# Altium footprint library StandardCase.PcbLib: 209 footprints (part 2 of 14)
Each footprint in its own frame and in the unit in brackets; x right, y up, seen from the top. Pads: shape width x height; smd on the part's side, far side on the other; paste and mask are expansions set on the pad; w line width, h text height; cw(c..) or ccw(c..) is an arc to the next point about the centre after c.
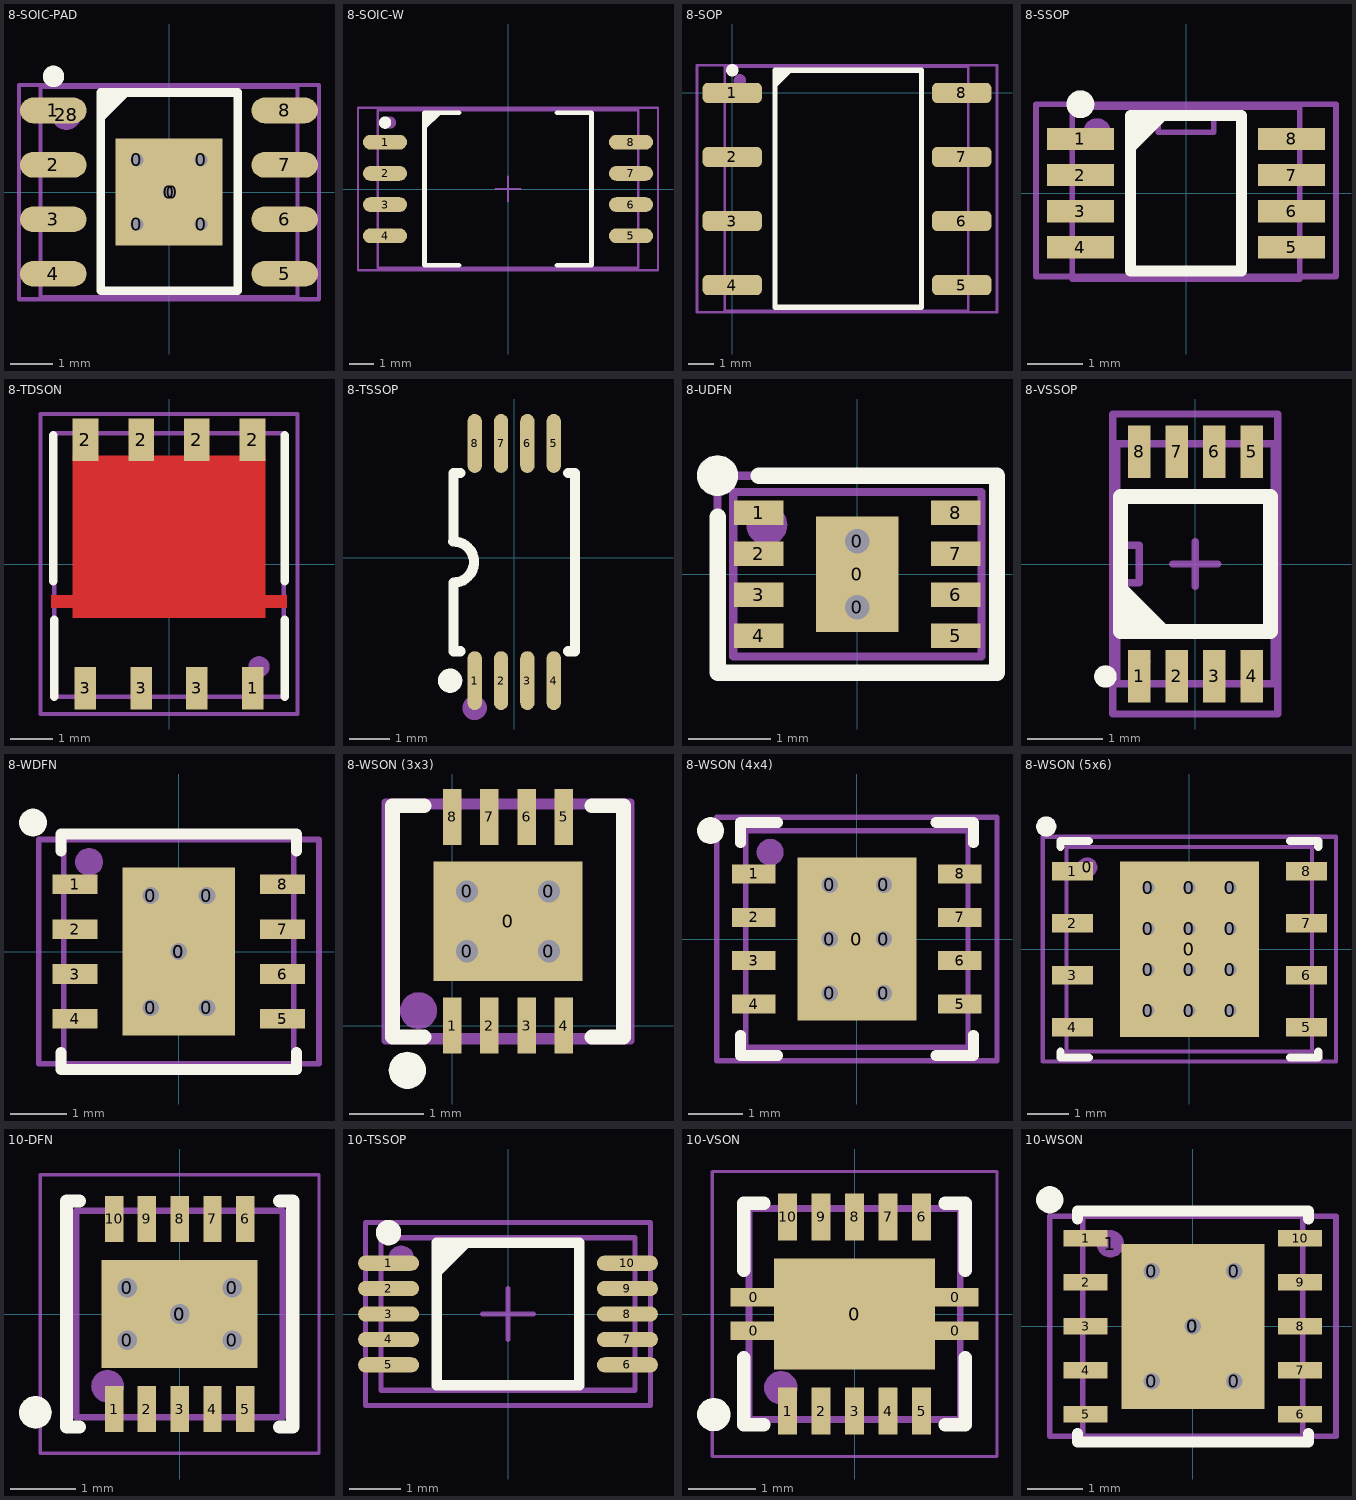
[diagram p1: the footprints below, top view; thin cyan lines are the x and y axes]

## 8-SOIC-PAD [mm] "pitch 1.27 mm, power pad"
pads (15):
  round 0.7 hole 0.3: 0(-0.75,-0.75) 0(-0.75,0.75) 0(0,0) 0(0.75,-0.75) 0(0.75,0.75)
  rrect100% 1.55x0.6 smd: 1(-2.7,1.905) 2(-2.7,0.635) 3(-2.7,-0.635) 4(-2.7,-1.905) 5(2.7,-1.905) 6(2.7,-0.635) 7(2.7,0.635) 8(2.7,1.905)
  round 0.7 on Mech1: 28(-2.395,1.8)
  rect 2.5x2.5 smd: " 0"(0,0)
Top Overlay:
  circle w0.25: c-2.695,2.7 r0.125
  region: -1.595,2.325 -1.595,1.605 -0.875,2.325
  lines w0.2: -1.595,-2.3 -1.595,2.325 1.605,2.325 1.605,-2.3 -1.595,-2.3
Mechanical 1:
  lines w0.1: -3,-2.45 3,-2.45 3,2.45 -3,2.45 -3,-2.45
Mechanical 15:
  lines w0.1: -0.25,0 0.25,0 ; 0,-0.25 0,0.25 ; -3.5,-2.5 3.5,-2.5 3.5,2.5 -3.5,2.5 -3.5,-2.5
3D body "User Library-SOIC-8-1.STEP": height 1.75, standoff 0, extent -3,-2.45 3,2.45

## 8-SOIC-W [mm] "pitch 1.27 mm, isolator"
pads (9):
  oval 1.8x0.6 smd: 1(-5,1.905) 2(-5,0.635) 3(-5,-0.635) 4(-5,-1.905) 5(5,-1.905) 6(5,-0.635) 7(5,0.635) 8(5,1.905)
  round 0.5 on Mech1: ""(-4.8,2.7)
Top Overlay:
  circle w0.25: c-5,2.7 r0.125
  region: -3.4,3.1 -3.4,2.38 -2.68,3.1
  lines w0.2: -2,-3.1 -3.4,-3.1 -3.4,3.1 -2,3.1 ; 2,-3.1 3.4,-3.1 3.4,3.1 2,3.1
Mechanical 1:
  lines w0.1: -5.3,-3.2 -5.3,3.2 5.3,3.2 5.3,-3.2 -5.3,-3.2
Mechanical 15:
  lines w0.1: -0.5,0 0.5,0 ; 0,-0.5 0,0.5 ; -6.1,-3.3 6.1,-3.3 6.1,3.3 -6.1,3.3 -6.1,-3.3
3D body "1EDC60I12AHXUMA1.STEP": height 1.7, standoff 0, extent -5.321,-3.18 5.321,3.17

## 8-SOP [mm] "pitch 2.54 mm"
pads (10):
  rrect50% 2.35x0.8 smd: 1(0,0) 2(0,-2.54) 3(0,-5.08) 4(0,-7.62) 5(9.1,-7.62) 6(9.1,-5.08) 7(9.1,-2.54) 8(9.1,0)
  round 0.5 on Top Overlay: ""(0,0.9)
  round 0.5 on Mech1: ""(0.3,0.5)
Top Overlay:
  region: 1.7,0.9 1.7,0.18 2.42,0.9
  lines w0.2: 1.7,-8.5 1.7,0.9 7.5,0.9 7.5,-8.5 1.7,-8.5
Mechanical 1:
  lines w0.1: -0.3,-8.63 -0.3,1.03 9.36,1.03 9.36,-8.63 -0.3,-8.63
Mechanical 15:
  lines w0.1: -1.4,-8.7 -1.4,1.1 10.5,1.1 10.5,-8.7 -1.4,-8.7
3D body "3120.STEP": height 4.79, standoff 0, extent -0.3,-8.63 9.36,1.03

## 8-SSOP [mm] "3x3 mm, pitch 0.65 mm"
height 1.1
pads (9):
  rect 1.2x0.4 smd: 1(-1.9,0.975) 2(-1.9,0.325) 3(-1.9,-0.325) 4(-1.9,-0.975) 5(1.9,-0.975) 6(1.9,-0.325) 7(1.9,0.325) 8(1.9,0.975)
  round 0.5 on Mech1: ""(-1.6,1.1)
Top Overlay:
  circle w0.25: c-1.9,1.6 r0.125
  region: -1,1.4 -1,0.68 -0.28,1.4
  lines w0.2: -1,-1.4 1,-1.4 1,1.4 -1,1.4 -1,-1.4
Mechanical 1:
  lines w0.1: -0.5,1.55 -0.5,1.1 0.5,1.1 0.5,1.55 ; -2.05,-1.55 2.05,-1.55 2.05,1.55 -2.05,1.55 -2.05,-1.55
Mechanical 15:
  lines w0.1: -2.7,-1.5 2.7,-1.5 2.7,1.6 -2.7,1.6 -2.7,-1.5
3D body "SW3dPS-TSSOP8-1.STEP": height 1.1, standoff 0, extent -2.05,-1.55 2.05,1.55

## 8-TDSON [mm] "pitch 1.3 mm, power pad"
height 1
pads (9):
  rect 0.5x1 smd: 1(1.95,-2.9) 3(-1.95,-2.9) 3(-0.65,-2.9) 3(0.65,-2.9)
  rect 0.6x1 smd: 2(-1.95,2.9) 2(-0.65,2.9) 2(0.65,2.9) 2(1.95,2.9)
  round 0.5 on Mech1: ""(2.1,-2.4)
Top Layer:
  region: -2.75,-1.025 -2.25,-1.025 -2.25,-1.25 2.25,-1.25 2.25,-1.025 2.75,-1.025 2.75,-0.725 -2.75,-0.725
  region: -2.25,2.525 -1.65,2.525 -0.95,2.525 -0.35,2.525 0.35,2.525 0.95,2.525 1.65,2.525 2.25,2.525 2.25,-0.725 2.75,-0.725 2.75,-1.025 -2.75,-1.025 -2.75,-0.725 -2.25,-0.725
Top Overlay:
  lines w0.2: -2.7,-0.4 -2.7,3 ; -2.675,-3.1 -2.675,-1.3 ; 2.7,-3.1 2.7,-1.3 ; 2.7,-0.4 2.7,3
Top Paste:
  rectangle: -2.25,-1.25 2.25,2.525
  rectangle: 2.25,-1.025 2.75,-0.725
  rectangle: -2.75,-1.025 -2.25,-0.725
Top Solder:
  region: -2.35,2.625 -2.35,-0.625 -2.85,-0.625 -2.85,-1.125 -2.35,-1.125 -2.35,-1.35 2.35,-1.35 2.35,-1.125 2.85,-1.125 2.85,-0.625 2.35,-0.625 2.35,2.625
Mechanical 1:
  lines w0.1: -2.675,-3.1 2.675,-3.1 2.675,3.05 -2.675,3.05 -2.675,-3.1
Mechanical 15:
  lines w0.1: -0.2,0 0.2,0 ; 0,-0.2 0,0.2 ; -3,-3.5 2.9,-3.5 3,-3.5 3,3.5 -3,3.5 -3,-3.5
3D body "User Library-TDSON-8-1.STEP": height 1.03, standoff 0.03, extent -2.675,-3.1 2.675,3.05

## 8-TSSOP [mm]
pads (8):
  oval 0.353x1.454 smd paste+0 mask+0.051: 1(-0.971,-3.035) 2(-0.321,-3.035) 3(0.329,-3.035) 4(0.979,-3.035) 5(0.979,2.819) 6(0.329,2.819) 7(-0.321,2.819) 8(-0.971,2.819)
Top Overlay:
  circle w0.3: c-1.578,-3.035 r0.15
  lines w0.254: -1.498,0.4 cw(c-1.497,-0.108) -1.496,-0.616 -1.496,-2.308 -1.324,-2.308 ; -1.496,0.4 -1.496,2.092 -1.324,2.092 ; 1.331,-2.308 1.504,-2.308 1.504,2.092 1.331,2.092
Mechanical 15:
  circle w0.3: c-0.972,-3.708 r0.15

## 8-UDFN [mm] "3x2 mm, pitch 0.5 mm, power pad"
height 0.75
pads (13):
  round 0.6 hole 0.3: 0(0,-0.4) 0(0,0.4)
  rect 1x1.4 smd: 0(0,0)
  rect 0.6x0.3 smd mask+0.05: 1(-1.2,0.75) 2(-1.2,0.25) 3(-1.2,-0.25) 4(-1.2,-0.75) 5(1.2,-0.75) 6(1.2,-0.25) 7(1.2,0.25) 8(1.2,0.75)
  round 0.5 on Top Overlay: ""(-1.7,1.2)
  round 0.5 on Mech1: ""(-1.1,0.6)
Top Overlay:
  lines w0.2: -1.7,0.7 -1.7,-1.2 1.7,-1.2 1.7,1.2 -1.2,1.2
Mechanical 1:
  lines w0.1: -1.51,-1 1.51,-1 1.51,1 -1.51,1 -1.51,-1
Mechanical 15:
  lines w0.1: -0.2,0 0.2,0 ; 0,-0.2 0,0.2 ; -1.7,-1.2 -1.7,1.2 1.7,1.2 1.7,-1.2 -1.7,-1.2
3D body "8UDFN.STEP": height 0.6, standoff 0, extent -1.51,-1 1.51,1

## 8-VSSOP [mm]
pads (10):
  rect 0.3x0.7 smd: 1(-0.75,-1.5) 2(-0.25,-1.5) 3(0.25,-1.5) 4(0.75,-1.5) 5(0.75,1.5) 6(0.25,1.5) 7(-0.25,1.5) 8(-0.75,1.5)
  round 0.3 on Top Overlay: ""(-1.2,-1.5)
  round 0.3 on Mech1: ""(-0.75,-1.3)
Top Overlay:
  region: -1,-0.9 -1,-0.2 -0.3,-0.9
  lines w0.2: -1,-0.9 1,-0.9 1,0.9 -1,0.9 -1,-0.9
Mechanical 1:
  lines w0.1: -1.05,-0.25 -0.75,-0.25 -0.75,0.25 -1.05,0.25 ; -1.05,-1.6 -1.05,1.6 1.05,1.6 1.05,-1.6 -1.05,-1.6
Mechanical 15:
  lines w0.1: -0.3,0 0.3,0 ; 0,-0.3 0,0.3 ; -1.1,-2 -1.1,2 1.1,2 1.1,-2 -1.1,-2
3D body "User Library-vsop8_rm0_5.STEP": height 0.9, standoff 0, extent -1.05,-1.6 1.05,1.6

## 8-WDFN [mm] "4x4 mm, pitch 0.8 mm, power pad"
height 0.75
pads (16):
  round 0.7 hole 0.3: 0(-0.5,-1) 0(-0.5,1) 0(0,0) 0(0.5,-1) 0(0.5,1)
  rect 2x3 smd: 0(0,0)
  rect 0.8x0.35 smd: 1(-1.85,1.2) 2(-1.85,0.4) 3(-1.85,-0.4) 4(-1.85,-1.2) 5(1.85,-1.2) 6(1.85,-0.4) 7(1.85,0.4) 8(1.85,1.2)
  round 0.5 on Top Overlay: ""(-2.6,2.3)
  round 0.5 on Mech1: ""(-1.6,1.6)
Top Overlay:
  lines w0.2: -2.1,-1.8 -2.1,-2.1 -2,-2.1 2.1,-2.1 2.1,-1.8 ; -2.1,1.8 -2.1,2.1 2,2.1 2.1,2.1 2.1,1.8
Mechanical 1:
  lines w0.1: -2.05,-2 2.05,-2 2.05,2 -2.05,2 -2.05,-2
Mechanical 15:
  lines w0.1: -0.3,0 0.3,0 ; 0,-0.3 0,0.3 ; -2.5,-2 2.5,-2 2.5,2 -2.5,2 -2.5,-2
3D body "SON127P600-8N.step": height 0.8, standoff 0, extent -2.05,-2 2.05,2

## 8-WSON (3x3) [mm] "3x3 mm, pitch 0.5 mm, power pad"
height 0.8
pads (15):
  round 0.7 hole 0.3: 0(0.2,1) 0(0.2,1.8) 0(1.3,1) 0(1.3,1.8)
  rect 2x1.6 smd: 0(0.75,1.4)
  rect 0.25x0.75 smd: 1(0,0) 2(0.5,0) 3(1,0) 4(1.5,0) 5(1.5,2.8) 6(1,2.8) 7(0.5,2.8) 8(0,2.8)
  round 0.5 on Top Overlay: ""(-0.6,-0.6)
  round 0.5 on Mech1: ""(-0.45,0.2)
Top Overlay:
  lines w0.2: -0.375,-0.15 -0.8,-0.15 -0.8,2.95 -0.375,2.95 ; 1.875,-0.15 2.3,-0.15 2.3,2.95 1.875,2.95
Mechanical 1:
  lines w0.1: -0.8,-0.15 2.3,-0.15 2.3,2.95 -0.8,2.95 -0.8,-0.15
Mechanical 15:
  lines w0.1: -0.9,-0.2 2.4,-0.2 2.4,3 -0.9,3 -0.9,-0.2
3D body "User Library-TI_NGQ0008A_SDA08A.STEP": height 0.8, standoff 0, extent -0.8,-0.15 2.3,2.95

## 8-WSON (4x4) [mm] "4x4 mm, pitch 0.8 mm, power pad"
height 0.8
pads (17):
  round 0.7 hole 0.3: 0(-0.5,-1) 0(-0.5,0) 0(-0.5,1) 0(0.5,-1) 0(0.5,0) 0(0.5,1)
  rect 2.2x3 smd paste-1.1: 0(0,0)
  rect 0.8x0.35 smd: 1(-1.9,1.2) 2(-1.9,0.4) 3(-1.9,-0.4) 4(-1.9,-1.2) 5(1.9,-1.2) 6(1.9,-0.4) 7(1.9,0.4) 8(1.9,1.2)
  round 0.5 on Top Overlay: ""(-2.7,2)
  round 0.5 on Mech1: ""(-1.6,1.6)
Top Overlay:
  lines w0.2: -2.15,-1.775 -2.15,-2.15 -1.46,-2.15 ; -2.15,1.775 -2.15,2.15 -1.46,2.15 ; 1.46,-2.15 2.15,-2.15 2.15,-1.775 ; 1.46,2.15 2.15,2.15 2.15,1.775
Top Paste:
  rectangle: 0.1,-1.4 1,-0.1
  rectangle: 0.1,0.1 1,1.4
  rectangle: -1,-1.4 -0.1,-0.1
  rectangle: -1,0.1 -0.1,1.4
Mechanical 1:
  lines w0.1: -2.05,-2 2.05,-2 2.05,2 -2.05,2 -2.05,1.95 -2.05,-2
Mechanical 15:
  lines w0.1: -0.5,0 0.5,0 ; 0,-0.5 0,0.5 ; -2.585,-2.25 2.585,-2.25 2.585,2.25 -2.585,2.25 -2.585,-2.25
3D body "SON127P600-8N.step": height 0.8, standoff 0, extent -2.05,-2 2.05,2

## 8-WSON (5x6) [mm] "5x6 mm, pitch 1.27 mm, power pad"
height 0.75
pads (23):
  round 0.5 on Mech1: 0(-2.5,2)
  round 0.7 hole 0.3: 0(-1,-1.5) 0(-1,-0.5) 0(-1,0.5) 0(-1,1.5) 0(0,-1.5) 0(0,-0.5) 0(0,0.5) 0(0,1.5) 0(1,-1.5) 0(1,-0.5) 0(1,0.5) 0(1,1.5)
  rect 3.4x4.3 smd paste-1.7: 0(0,0)
  rect 1x0.45 smd: 1(-2.86,1.905) 2(-2.86,0.635) 3(-2.86,-0.635) 4(-2.86,-1.905) 5(2.86,-1.905) 6(2.86,-0.635) 7(2.86,0.635) 8(2.86,1.905)
  round 0.5 on Top Overlay: ""(-3.5,3)
Top Overlay:
  lines w0.2: -3.15,-2.505 -3.15,-2.65 -2.46,-2.65 ; -3.15,2.505 -3.15,2.65 -2.46,2.65 ; 2.46,-2.65 3.15,-2.65 3.15,-2.505 ; 2.46,2.65 3.15,2.65 3.15,2.505
Top Paste:
  rectangle: -1.595,0.815 -0.665,2.045
  rectangle: -1.595,-0.615 -0.665,0.615
  rectangle: -1.595,-2.045 -0.665,-0.815
  rectangle: -0.465,0.815 0.465,2.045
  rectangle: -0.465,-0.615 0.465,0.615
  rectangle: -0.465,-2.045 0.465,-0.815
  rectangle: 0.665,0.815 1.595,2.045
  rectangle: 0.665,-0.615 1.595,0.615
  rectangle: 0.665,-2.045 1.595,-0.815
Mechanical 1:
  lines w0.1: -3,-2.5 -3,2.5 3,2.5 3,-2.5 -3,-2.5
Mechanical 15:
  lines w0.1: -0.5,0 0.5,0 ; 0,-0.5 0,0.5 ; -3.585,-2.75 -3.585,2.75 3.585,2.75 3.585,-2.75 -3.585,-2.75
3D body "User Library-WSON-8.STEP": height 0.8, standoff 0, extent -3.048,-2.499 2.952,2.501

## 10-DFN [mm] "3x3 mm, pitch 0.5 mm, power pad"
height 1
pads (18):
  round 0.7 hole 0.3: 0(-0.8,-0.4) 0(-0.8,0.4) 0(0,0) 0(0.8,-0.4) 0(0.8,0.4)
  rect 2.38x1.64 smd mask+0.11: 0(0,0)
  rect 0.28x0.7 smd mask+0.11: 1(-1,-1.45) 2(-0.5,-1.45) 3(0,-1.45) 4(0.5,-1.45) 5(1,-1.45) 6(1,1.45) 7(0.5,1.45) 8(0,1.45) 9(-0.5,1.45) 10(-1,1.45)
  round 0.5 on Top Overlay: ""(-2.2,-1.5)
  round 0.5 on Mech1: ""(-1.1,-1.1)
Top Overlay:
  lines w0.2: -1.525,-1.725 -1.725,-1.725 -1.725,0.275 -1.725,1.725 -1.525,1.725 ; 1.525,-1.725 1.725,-1.725 1.725,0.275 1.725,1.725 1.525,1.725
Mechanical 1:
  lines w0.1: -1.575,-1.575 -1.575,1.575 1.575,1.575 1.575,-1.575 -1.575,-1.575
Mechanical 15:
  lines w0.05: -2.125,-2.125 -2.125,2.125 2.125,2.125 2.125,-2.125 -2.125,-2.125
3D body "User Library-My-DFN-10-3x3-0_5.STEP": height 0.8, standoff 0, extent -1.55,-1.56 1.55,1.56

## 10-TSSOP [mm] "3x3 mm, pitch 0.5 mm"
height 1.1
pads (11):
  rrect100% 1.2x0.3 smd: 1(-2.35,1) 2(-2.35,0.5) 3(-2.35,0) 4(-2.35,-0.5) 5(-2.35,-1) 6(2.35,-1) 7(2.35,-0.5) 8(2.35,0) 9(2.35,0.5) 10(2.35,1)
  round 0.5 on Mech1: ""(-2.1,1.1)
Top Overlay:
  circle w0.25: c-2.35,1.6 r0.125
  region: -1.4,1.4 -1.4,0.68 -0.68,1.4
  lines w0.2: -1.4,-1.4 -1.4,1.4 1.4,1.4 1.4,-1.4 -1.4,-1.4
Mechanical 1:
  lines w0.1: -2.5,-1.5 2.5,-1.5 2.5,1.5 -2.5,1.5 -2.5,-1.5
Mechanical 15:
  lines w0.1: -0.5,0 0.5,0 ; 0,-0.5 0,0.5 ; -2.8,-1.8 -2.8,1.8 2.8,1.8 2.8,-1.8 -2.8,-1.8
3D body "TSSOP-10.STEP": height 1.1, standoff 0, extent -2.5,-1.5 2.5,1.5

## 10-VSON [mm] "3x3 mm, pitch 0.5 mm, power pad"
height 1
pads (17):
  rect 0.7x0.28 smd mask+0.11: 0(-1.5,-0.25) 0(-1.5,0.25) 0(1.5,-0.25) 0(1.5,0.25)
  rect 2.4x1.65 smd mask+0.11: 0(0,0)
  rect 0.28x0.7 smd mask+0.11: 1(-1,-1.45) 2(-0.5,-1.45) 3(0,-1.45) 4(0.5,-1.45) 5(1,-1.45) 6(1,1.45) 7(0.5,1.45) 8(0,1.45) 9(-0.5,1.45) 10(-1,1.45)
  round 0.5 on Top Overlay: ""(-2.1,-1.5)
  round 0.5 on Mech1: ""(-1.1,-1.1)
Top Overlay:
  lines w0.2: -1.65,-0.65 -1.65,-1.65 -1.35,-1.65 ; -1.65,0.65 -1.65,1.65 -1.35,1.65 ; 1.35,-1.65 1.65,-1.65 1.65,-0.65 ; 1.35,1.65 1.65,1.65 1.65,0.65
Mechanical 1:
  lines w0.1: -1.575,-1.575 -1.575,1.575 1.575,1.575 1.575,-1.575 -1.575,-1.575
Mechanical 15:
  lines w0.05: -2.125,-2.125 -2.125,2.125 2.125,2.125 2.125,-2.125 -2.125,-2.125
3D body "User Library-My-DFN-10-3x3-0_5.STEP": height 0.8, standoff 0, extent -1.55,-1.56 1.55,1.56

## 10-WSON [mm] "4x4 mm, pitch 0.5 mm, power pad"
height 0.8
pads (18):
  round 0.7 hole 0.3: 0(-0.75,-1) 0(-0.75,1) 0(0,0) 0(0.75,-1) 0(0.75,1)
  rect 2.6x3 smd: 0(0,0)
  rect 0.8x0.3 smd: 1(-1.95,1.6) 2(-1.95,0.8) 3(-1.95,0) 4(-1.95,-0.8) 5(-1.95,-1.6) 6(1.95,-1.6) 7(1.95,-0.8) 8(1.95,0) 9(1.95,0.8) 10(1.95,1.6)
  round 0.5 on Mech1: 1(-1.5,1.5)
  round 0.5 on Top Overlay: ""(-2.6,2.3)
Top Overlay:
  lines w0.2: -2.1,-1.95 -2.1,-2.1 2.1,-2.1 2.1,-1.95 ; -2.1,1.95 -2.1,2.1 2.1,2.1 2.1,1.95
Mechanical 1:
  lines w0.1: -2,-2 -2,2 2,2 2,-2 -2,-2
Mechanical 15:
  lines w0.1: -0.3,0 0.3,0 ; 0,-0.3 0,0.3 ; -2.6,-2 -2.6,2 2.6,2 2.6,-2 -2.6,-2
3D body "User Library-WSON-10-1.STEP": height 0.8, standoff 0, extent -2,-2 2,2